# Altium integrated library StudentsLibrary.IntLib: 806 symbols (part 3 of 10)
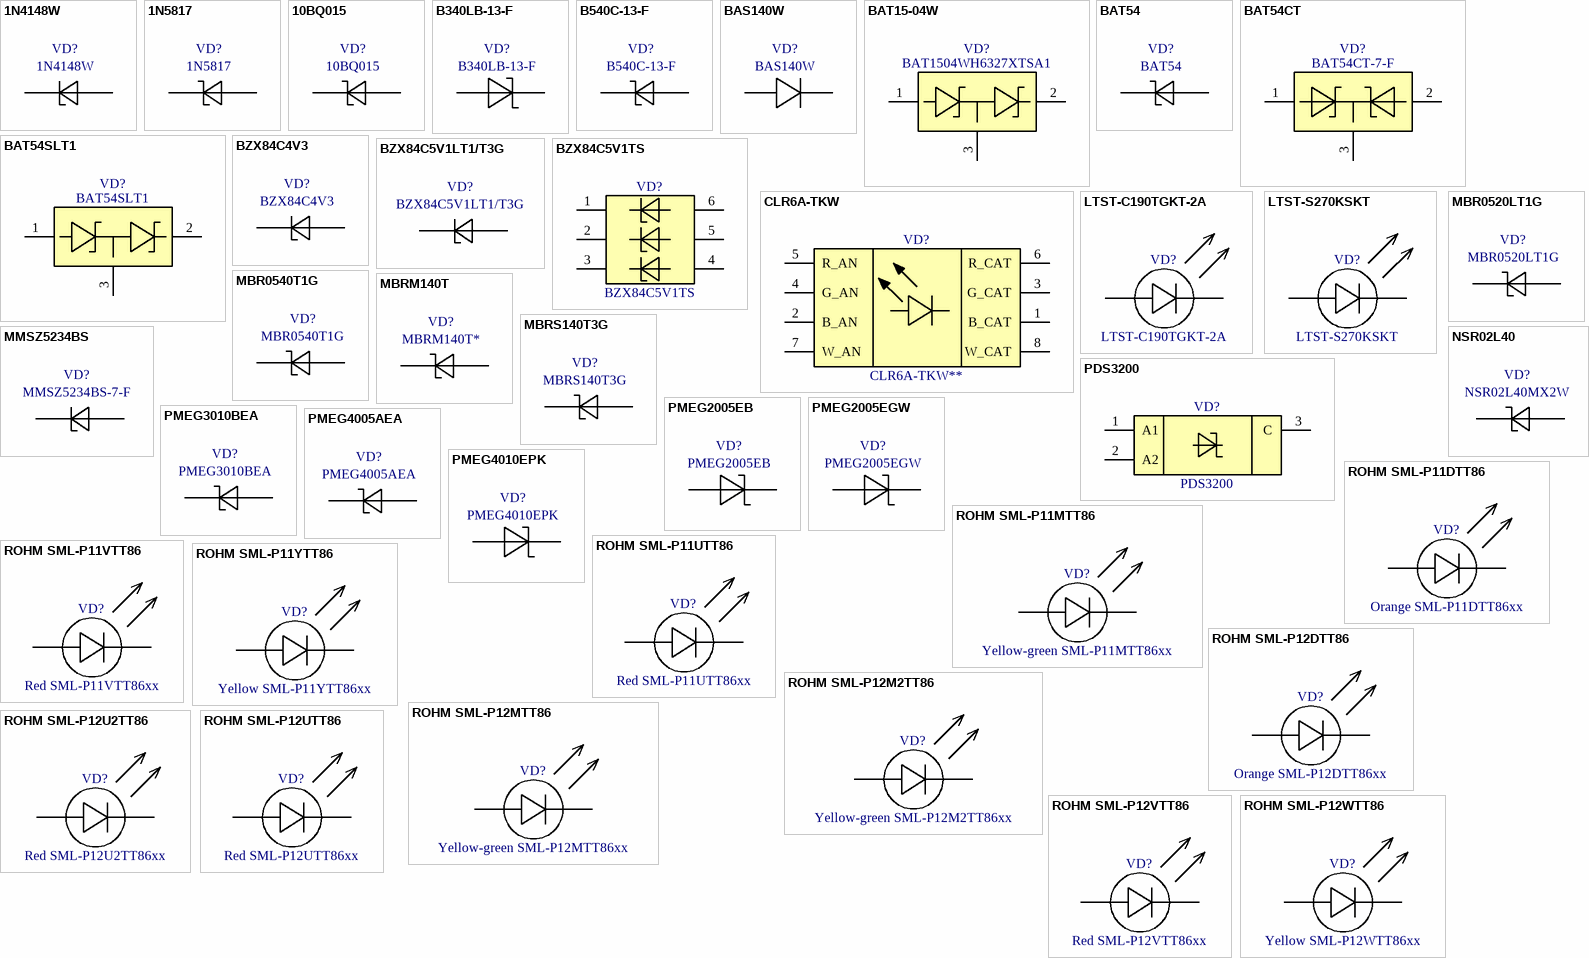
[diagram p49: symbols 1N4148W to ROHM SML-P12WTT86]

## ROHM SML-P12UTT86
designator VD?, comment Red SML-P12UTT86xx
PICOLED™, Ultra-small and Ultra-thin, Red Chip LED; Manufacturer: ROHM; I_Forward: 20 мА; V_Forward: 2 В; PartNumber: SML-P12UTT86xx; Color: Red; ComponentLink1Description: Product Page; ComponentLink1URL: https://www.rohm.com/products/led/chip-leds-mono-color-type/standard/sml-p12ut_r_-product; Package: 0402; ComponentLink2Description: DataSheet; ComponentLink2URL: https://fscdn.rohm.com/en/products/databook/datasheet/opto/led/chip_mono/sml-p12utt86(r)-e.pdf
footprint ROHM SML-P12UTT86 (ROHM LED 0402 Top View Red (Code U) 1.0x0.6x0.25)
pins: A, C
1 alternate drawing of the same symbol

## ROHM SML-P12VTT86
designator VD?, comment Red SML-P12VTT86xx
PICOLED™, Ultra-small and Ultra-thin, Red Chip LED; Manufacturer: ROHM; I_Forward: 20 мА; V_Forward: 2 В; PartNumber: SML-P12VTT86xx; Color: Red; ComponentLink1Description: Product Page; ComponentLink1URL: https://www.rohm.com/products/led/chip-leds-mono-color-type/standard/sml-p12vt_r_-product; Package: 0402; ComponentLink2Description: DataSheet; ComponentLink2URL: https://fscdn.rohm.com/en/products/databook/datasheet/opto/led/chip_mono/sml-p12vtt86(r)-e.pdf
footprint ROHM SML-P12VTT86 (ROHM LED 0402 Top View Red (Code V) 1.0x0.6x0.25)
pins: A, C
1 alternate drawing of the same symbol

## ROHM SML-P12WTT86
designator VD?, comment Yellow SML-P12WTT86xx
PICOLED™, Ultra-small and Ultra-thin, Yellow Chip LED; Manufacturer: ROHM; I_Forward: 20 мА; V_Forward: 2,1 В; PartNumber: SML-P12WTT86xx; Color: Yellow; ComponentLink1Description: Product Page; ComponentLink1URL: https://www.rohm.com/products/led/chip-leds-mono-color-type/standard/sml-p12wt_r_-product; Package: 0402; ComponentLink2Description: DataSheet; ComponentLink2URL: https://fscdn.rohm.com/en/products/databook/datasheet/opto/led/chip_mono/sml-p12wtt86(r)-e.pdf
footprint ROHM SML-P12WTT86 (ROHM LED 0402 Top View Yellow (Code W) 1.0x0.6x0.25)
pins: A, C
1 alternate drawing of the same symbol

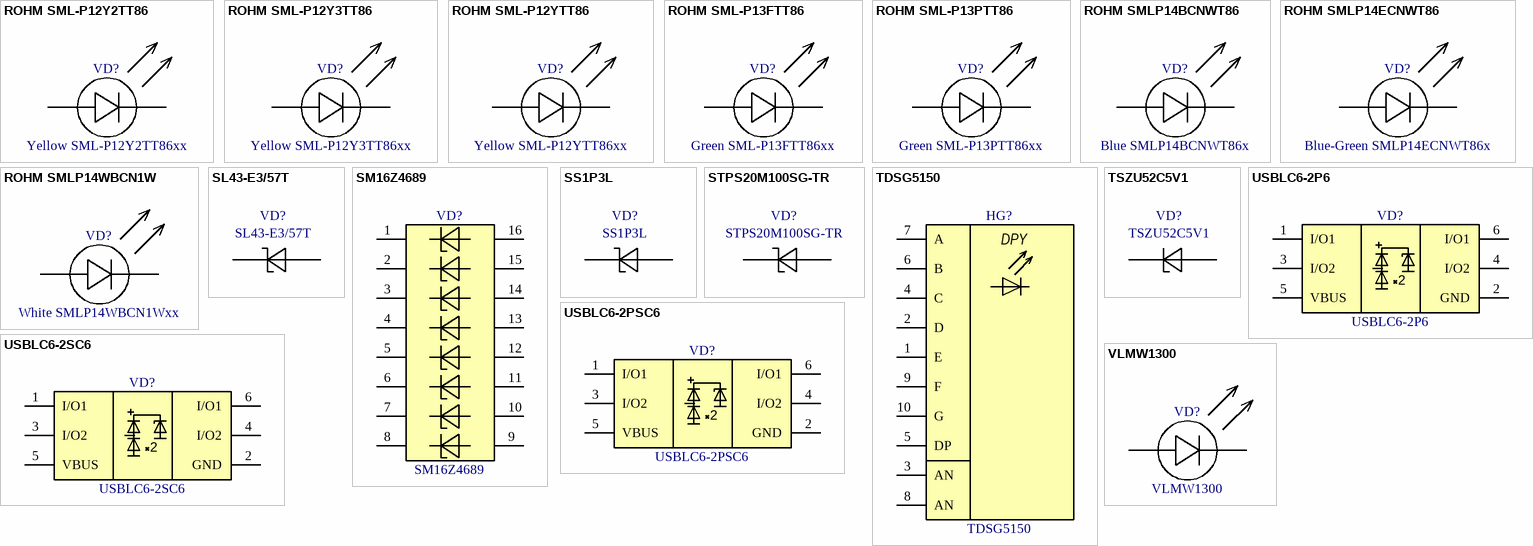
[diagram p6: symbols ROHM SML-P12Y2TT86 to VLMW1300]

## ROHM SML-P12Y2TT86
designator VD?, comment Yellow SML-P12Y2TT86xx
PICOLED™, Ultra-small and Ultra-thin, Yellow Chip LED; Manufacturer: ROHM; I_Forward: 20 мА; V_Forward: 2,1 В; PartNumber: SML-P12Y2TT86xx; Color: Yellow; ComponentLink1Description: Product Page; ComponentLink1URL: https://www.rohm.com/products/led/chip-leds-mono-color-type/standard/sml-p12y2t_r_-product; Package: 0402; ComponentLink2Description: DataSheet; ComponentLink2URL: https://fscdn.rohm.com/en/products/databook/datasheet/opto/led/chip_mono/sml-p12y2tt86(r)-e.pdf
footprint ROHM SML-P12Y2TT86 (ROHM LED 0402 Top View Yellow (Code Y2) 1.0x0.6x0.25)
pins: A, C
1 alternate drawing of the same symbol

## ROHM SML-P12Y3TT86
designator VD?, comment Yellow SML-P12Y3TT86xx
PICOLED™, Ultra-small and Ultra-thin, Yellow Chip LED; Manufacturer: ROHM; I_Forward: 20 мА; V_Forward: 2,1 В; PartNumber: SML-P12Y3TT86xx; Color: Yellow; ComponentLink1Description: Product Page; ComponentLink1URL: https://www.rohm.com/products/led/chip-leds-mono-color-type/standard/sml-p12y3t_r_-product; Package: 0402; ComponentLink2Description: DataSheet; ComponentLink2URL: https://fscdn.rohm.com/en/products/databook/datasheet/opto/led/chip_mono/sml-p12y3tt86(r)-e.pdf
footprint ROHM SML-P12Y3TT86 (ROHM LED 0402 Top View Yellow (Code Y3) 1.0x0.6x0.25)
pins: A, C
1 alternate drawing of the same symbol

## ROHM SML-P12YTT86
designator VD?, comment Yellow SML-P12YTT86xx
PICOLED™, Ultra-small and Ultra-thin, Yellow Chip LED; Manufacturer: ROHM; I_Forward: 20 мА; V_Forward: 2,1 В; PartNumber: SML-P12YTT86xx; Color: Yellow; ComponentLink1Description: Product Page; ComponentLink1URL: https://www.rohm.com/products/led/chip-leds-mono-color-type/standard/sml-p12yt_r_-product; Package: 0402; ComponentLink2Description: DataSheet; ComponentLink2URL: https://fscdn.rohm.com/en/products/databook/datasheet/opto/led/chip_mono/sml-p12ytt86(r)-e.pdf
footprint ROHM SML-P12YTT86 (ROHM LED 0402 Top View Yellow (Code Y) 1.0x0.6x0.25)
pins: A, C
1 alternate drawing of the same symbol

## ROHM SML-P13FTT86
designator VD?, comment Green SML-P13FTT86xx
PICOLED™, Ultra-small and Ultra-thin, Green Chip LED; Manufacturer: ROHM; I_Forward: 20 мА; V_Forward: 2,1 В; PartNumber: SML-P13FTT86xx; Color: Green; ComponentLink1Description: Product Page; ComponentLink1URL: https://www.rohm.com/products/led/chip-leds-mono-color-type/standard/sml-p13ft_r_-product; Package: 0402; ComponentLink2Description: DataSheet; ComponentLink2URL: https://fscdn.rohm.com/en/products/databook/datasheet/opto/led/chip_mono/sml-p13ftt86(r)-e.pdf
footprint ROHM SML-P13FTT86 (ROHM LED 0402 Top View Green (Code F) 1.0x0.6x0.25)
pins: A, C
1 alternate drawing of the same symbol

## ROHM SML-P13PTT86
designator VD?, comment Green SML-P13PTT86xx
PICOLED™, Ultra-small and Ultra-thin, Green Chip LED; Manufacturer: ROHM; I_Forward: 20 мА; V_Forward: 2,1 В; PartNumber: SML-P13PTT86xx; Color: Green; ComponentLink1Description: Product Page; ComponentLink1URL: https://www.rohm.com/products/led/chip-leds-mono-color-type/standard/sml-p13pt_r_-product; Package: 0402; ComponentLink2Description: DataSheet; ComponentLink2URL: https://fscdn.rohm.com/en/products/databook/datasheet/opto/led/chip_mono/sml-p13ptt86(r)-e.pdf
footprint ROHM SML-P13PTT86 (ROHM LED 0402 Top View Green (Code P) 1.0x0.6x0.25)
pins: A, C
1 alternate drawing of the same symbol

## ROHM SMLP14BCNWT86
designator VD?, comment Blue SMLP14BCNWT86x
PICOLED™, Ultra-small and Ultra-thin, High Brightness Blue Chip LED; Manufacturer: ROHM; I_Forward: 5 мА; V_Forward: 2,9 В; PartNumber: SMLP14BCNWT86x; Color: Blue; ComponentLink1Description: Product Page; ComponentLink1URL: https://www.rohm.com/products/led/chip-leds-mono-color-type/standard/smlp14bcnw-product; Package: 0402; ComponentLink2Description: DataSheet; ComponentLink2URL: https://fscdn.rohm.com/en/products/databook/datasheet/opto/led/chip_mono/smlp14bcnwt86-e.pdf
footprint ROHM SMLP14BCNWT86 (ROHM LED 0402 Top View Blue (Code B) 1.0x0.6x0.25)
pins: A, C
1 alternate drawing of the same symbol

## ROHM SMLP14ECNWT86
designator VD?, comment Blue-Green SMLP14ECNWT86x
PICOLED™, Ultra-small and Ultra-thin, High Brightness Green Chip LED; Manufacturer: ROHM; I_Forward: 10 мА; V_Forward: 3 В; PartNumber: SMLP14ECNWT86x; Color: Blue-Green; ComponentLink1Description: Product Page; ComponentLink1URL: https://www.rohm.com/products/led/chip-leds-mono-color-type/standard/smlp14ecnw-product; Package: 0402; ComponentLink2Description: DataSheet; ComponentLink2URL: https://fscdn.rohm.com/en/products/databook/datasheet/opto/led/chip_mono/smlp14ecnwt86-e.pdf
footprint ROHM SMLP14ECNWT86 (ROHM LED 0402 Top View Blue Green (Code EC) 1.0x0.6x0.25)
pins: A, C
1 alternate drawing of the same symbol

## ROHM SMLP14WBCN1W
designator VD?, comment White SMLP14WBCN1Wxx
PICOLED™, Ultra-small and Ultra-thin, High Brightness White Chip LED; Manufacturer: ROHM; I_Forward: 5 мА; V_Forward: 2,9 В; PartNumber: SMLP14WBCN1Wxx; Color: White; ComponentLink1Description: Product Page; ComponentLink1URL: https://www.rohm.com/products/led/chip-leds-mono-color-type/standard/smlp14wbcn1w-product; Package: 0402; ComponentLink2Description: DataSheet; ComponentLink2URL: https://fscdn.rohm.com/en/products/databook/datasheet/opto/led/chip_mono/smlp14wbcn1w1-e.pdf
footprint ROHM SMLP14BCNWT86 (ROHM LED 0402 Top View Blue (Code B) 1.0x0.6x0.25)
pins: A, C
1 alternate drawing of the same symbol

## SL43-E3/57T
designator VD?
SCHOTTKY BARRIER RECTIFIER 4 AMPERES, 30 VOLTS; Manufacturer: Vishay; PartNumber: SL43-E3/57T; ComponentLink1Description: Product Page; ComponentLink1URL: https://www.vishay.com/en/product/88742/
footprint DIOM794X590X262L114X300N (Diode, Molded Body; 6.855 mm L X 5.905 mm W X 2.62 mm H body)
pins: A, C

## SM16Z4689
designator VD?
5.1 Volt Zener Diode Array; Manufacturer: Microchip; PartNumber: SM16Z4689
footprint SOIC16P127_959X599X175L84X40N (Small Outline IC (SOIC), 1.27 mm pitch; 16 pin, 9.595 mm L X 3.91 mm W X 1.75 mm H body)
pins: 1, 2, 3, 4, 5, 6, 7, 8, 9, 10, 11, 12, 13, 14, 15, 16

## SS1P3L
designator VD?
Low VF High Current Density Surface-MountSchottky Barrier Rectifiers; Manufacturer: Vishay; PartNumber: SS1P3L; ComponentLink1Description: Product Page; ComponentLink1URL: https://www.vishay.com/en/product/88915/
footprint DO-220AA (Vishay DO-220AA)
pins: A, C

## STPS20M100SG-TR
designator VD?
100 V, 20 A 3-lead single Low Drop Power Schottky Rectifier; Manufacturer: STMicroelectronics; PartNumber: STPS20M100SG-TR; ComponentLink1Description: Product Page; ComponentLink1URL: https://www.st.com/en/diodes-and-rectifiers/stps20m100s.html; ComponentLink2Description: DataSheet; ComponentLink2URL: https://www.st.com/resource/en/datasheet/stps20m100s.pdf
footprint DPAK254P1542X460-3N (D2-PAK, 3-Pads, Body 7,78x8,64mm (max), IPC Medium Density)
pins: 1, 3 A, 4 C

## TDSG5150
designator HG?
Standard 7-Segment Display 13 mm, Green, Common anode; Manufacturer: Vishay; Face: Grey; PartNumber: TDSG5150; Color: Green; ComponentLink1Description: Product Page; ComponentLink1URL: https://www.vishay.com/en/product/83126/; ComponentLink2Description: DataSheet; ComponentLink2URL: https://www.vishay.com/docs/83126/tdsx51x0.pdf
footprint VISHAY TDSG5150 (VISHAY 7-digit display 13mm, Face Grey, Color Green)
pins: 1 E, 2 D, 3 AN, 4 C, 5 DP, 6 B, 7 A, 8 AN, 9 F, 10 G
1 alternate drawing of the same symbol
text: DPY

## TSZU52C5V1
designator VD?
SMD Zener Diode; Manufacturer: Taiwan Semiconductor; PartNumber: TSZU52C5V1; ComponentLink1Description: Product Page; ComponentLink1URL: https://www.taiwansemi.com/en/products/details/TSZU52C5V1; ComponentLink2Description: DataSheet; ComponentLink2URL: https://www.taiwansemi.com/assets/uploads/datasheet/TSZU52C2V0%20SERIES_G2009.pdf
footprint DIOC170X90X85L45N (Diode, Chip; 1.70 mm L X 0.90 mm W X 0.85 mm H body)
pins: A, C

## USBLC6-2P6
designator VD?
Very low capacitance ESD protection USB 2.0, SOT-666; Manufacturer: STMicroelectronics; PartNumber: USBLC6-2P6; ComponentLink1Description: Product Page; ComponentLink1URL: https://www.st.com/en/protections-and-emi-filters/usblc6-2.html; ComponentLink2Description: DataSheet; ComponentLink2URL: https://www.st.com/resource/en/datasheet/usblc6-2.pdf
footprint STM SOT-666 (Diode, Small Outline Flat Lead (SOFL), 0.50 mm pitch; 6 pin, 1.60 mm L X 1.20 mm W X 0.62 mm H body)
pins: 1 I/O1, 2 GND, 3 I/O2, 4 I/O2, 5 VBUS, 6 I/O1

## USBLC6-2PSC6
designator VD?
Very low capacitance ESD protection USB 2.0, SOT-23-6L; Manufacturer: STMicroelectronics; PartNumber: USBLC6-2PSC6; ComponentLink1Description: Product Page; ComponentLink1URL: https://www.st.com/en/protections-and-emi-filters/usblc6-2.html; ComponentLink2Description: DataSheet; ComponentLink2URL: https://www.st.com/resource/en/datasheet/usblc6-2.pdf
footprint SOT23-6P95_280X145L45X40N (Small Outline Transistor (SOT23), 0.95 mm pitch; 6 pin, 2.925 mm L X 1.625 mm W X 1.45 mm H body)
pins: 1 I/O1, 2 GND, 3 I/O2, 4 I/O2, 5 VBUS, 6 I/O1

## USBLC6-2SC6
designator VD?
Very low capacitance ESD protection USB 2.0, SOT-23-6L; Manufacturer: STMicroelectronics; PartNumber: USBLC6-2SC6; ComponentLink1Description: Product Page; ComponentLink1URL: https://www.st.com/en/protections-and-emi-filters/usblc6-2.html; ComponentLink2Description: DataSheet; ComponentLink2URL: https://www.st.com/resource/en/datasheet/usblc6-2.pdf
footprint SOT23-6P95_280X145L45X40N (Small Outline Transistor (SOT23), 0.95 mm pitch; 6 pin, 2.925 mm L X 1.625 mm W X 1.45 mm H body)
pins: 1 I/O1, 2 GND, 3 I/O2, 4 I/O2, 5 VBUS, 6 I/O1

## VLMW1300
designator VD?
Highbright 0603 ChipLED, White; Manufacturer: Vishay; I_Forward: 5 mA; V_Forward: 2.9 V; PartNumber: VLMW1300; Color: White; ComponentLink1Description: Product Page; ComponentLink1URL: https://www.vishay.com/en/product/82435/; ComponentLink2Description: DataSheet; ComponentLink2URL: https://www.vishay.com/docs/82435/vlmw1300.pdf
footprint VISHAY ChipLED SMD0603 (Vishay LED SMD0603 White)
pins: A, C


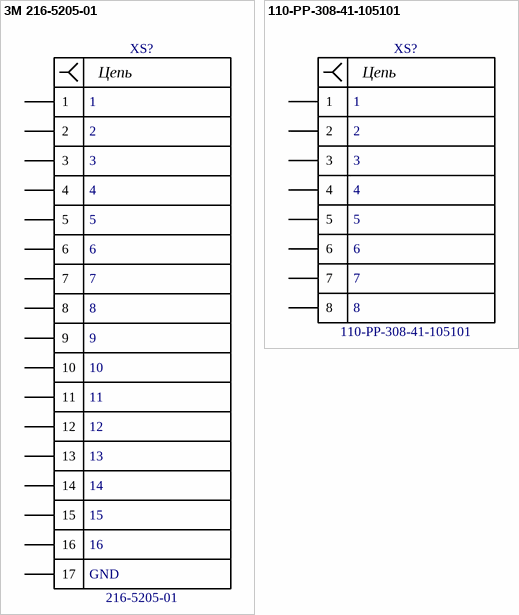
[diagram p7: symbols 3M 216-5205-01 to 110-PP-308-41-105101]

## 3M 216-5205-01
designator XS?, comment 216-5205-01  Net17: GND  Net16: 16  Net15: 15  Net14: 14  Net13: 13  Net12: 12  Net11: 11  Net10: 10  Net9: 9  Net8: 8  Net7: 7  Net6: 6  Net5: 5  Net4: 4  Net3: 3  Net2: 2  Net1: 1
3M™ Textool™ Open-Top Sockets for QFN Applications, 0.5 mm Pitch, 16 Pos, Even Row, 3x3 Pkg; Manufacturer: 3M; PartNumber: 216-5205-01; ComponentLink1Description: Product Page; ComponentLink1URL: https://www.precidip.com/pview/110-PP-308-41-105101.html
footprint 3M 216-5205-01 (3M™ Textool™ Open-Top Sockets for QFN Applications, 0.5 mm Pitch, 16 Pos, Even Row, 3x3 Pkg)
pins: 1, 2, 3, 4, 5, 6, 7, 8, 9, 10, 11, 12, 13, 14, 15, 16, 17
text: Цепь

## 110-PP-308-41-105101
designator XS?  Net8: 8  Net7: 7  Net6: 6  Net5: 5  Net4: 4  Net3: 3  Net2: 2  Net1: 1
DIP SMT SOCKET Pitch 2.54mm 8 Poles Width 7.62mm; Manufacturer: Preci-DIP; PartNumber: 110-PP-308-41-105101; ComponentLink1Description: Product Page; ComponentLink1URL: https://www.precidip.com/pview/110-PP-308-41-105101.html
footprint 110-PP-310-41-105101 (DIP SMT SOCKET Pitch 2.54mm 8 Poles Width 7.62mm)
pins: 1, 2, 3, 4, 5, 6, 7, 8
text: Цепь


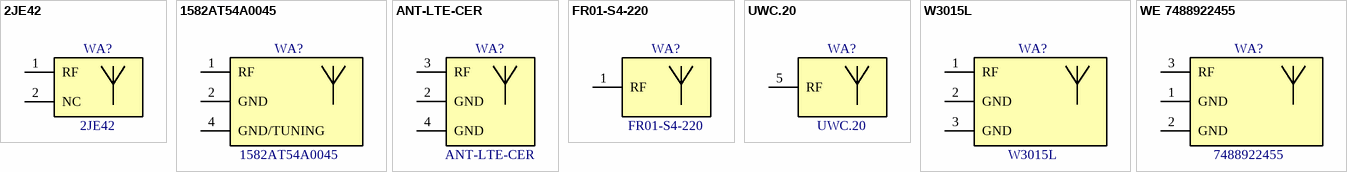
[diagram p8: symbols 2JE42 to WE 7488922455]

## 2JE42
designator WA?
915 MHz ISM Surface Mount; Manufacturer: 2J Antennas; PartNumber: 2JE42; ComponentLink1Description: Product Page; ComponentLink1URL: https://www.2j-antennas.com/antennas/single-internal-antennas/2je42-915-mhz-ism-surface-mount-compact-fiberglass-antenna/676; ComponentLink2Description: DataSheet; ComponentLink2URL: https://www.2j-antennas.com/media/original/datasheets/2je42.pdf
footprint 2JE42 (915 MHz ISM Surface Mount)
pins: 1 RF, 2 NC

## 1582AT54A0045
designator WA?
1.585GHz Global Navigation (GPS, GLONASS, Beidou, Galileo) SMD Chip Antenna; Manufacturer: Johanson Technology; PartNumber: 1582AT54A0045; ComponentLink1Description: Product Page; ComponentLink1URL: https://www.johansontechnology.com/antennas?option=com_products&id=1582AT54A0045; ComponentLink2Description: DataSheet; ComponentLink2URL: https://www.johansontechnology.com/datasheets/1582AT54A0045/1582AT54A0045.pdf
footprint 1582AT54A0045 (Johanson Technology chip antenna 1582AT54A0045)
pins: 1 RF, 2 GND, 4 GND/TUNING

## ANT-LTE-CER
designator WA?
Ceramic  4G/3G/2G LTE Antenna; Manufacturer: Linx Technologies; PartNumber: ANT-LTE-CER; ComponentLink1Description: Product Page; ComponentLink1URL: https://linxtechnologies.com/wp/product/lte-chip-antenna/
footprint ANT-LTE-CER (Linx ANT-LTE-CER)
pins: 1 NC hidden, 2 GND, 3 RF, 4 GND, 5 NC hidden

## FR01-S4-220
designator WA?
The ALL mXTENDTM chip antenna standards GSM850, GSM900,  GSM1800/DCS, GSM1900/PCS, UMTS, LTE700, LTE800, LTE850, LTE900, LTE1700,  LTE1800, LTE1900, LTE2000, LTE2100, LTE2300, LTE2500, and LTE2600; Manufacturer: Ignion; PartNumber: FR01-S4-220
footprint FR01-S4-220 (ALL mXTEND FR01-S4-220)
pins: 1 RF, 2 NC hidden, 3 NC hidden, 4 NC hidden

## UWC.20
designator WA?
3-5GHz & 6-9GHz Ultra-Wide Band (UWB) SMD Chip Antenna; Manufacturer: Taoglas; PartNumber: UWC.20; ComponentLink1Description: Product Page; ComponentLink1URL: https://www.taoglas.com/product/uwc-20-3-5ghz-6-9ghz-ultra-wideband-uwb-smd-chip-antenna/
footprint UWC.20 (Taoglas Chip-antenna 12mm x 12mm x 3.3mm, GND plane offset 2.4 mm)
pins: 1 NC hidden, 2 NC hidden, 3 NC hidden, 4 NC hidden, 5 RF, 6 NC hidden

## W3015L
designator WA?
ISM433MHz Embedded Antenna; Manufacturer: Pulse; PartNumber: W3015L; ComponentLink1Description: Product Page; ComponentLink1URL: https://productfinder.pulseelectronics.com/product/w3015l
footprint W3015L (Pulse Chip Antenna 3.15 mm X 10 mm X 4 mm)
pins: 1 RF, 2 GND, 3 GND

## WE 7488922455
designator WA?, comment 7488922455
WE-MCA Multilayer Chip Antenna 2400-2500 MHz, 5000-6000 MHz; Manufacturer: Wurth Elekntronik; PartNumber: 7488922455; ComponentLink1Description: Product Page; ComponentLink1URL: https://www.we-online.com/en/components/products/WE-MCA_WCO
footprint WE 7488922455 (WE-MCA Multilayer Chip Antenna)
pins: 1 GND, 2 GND, 3 RF


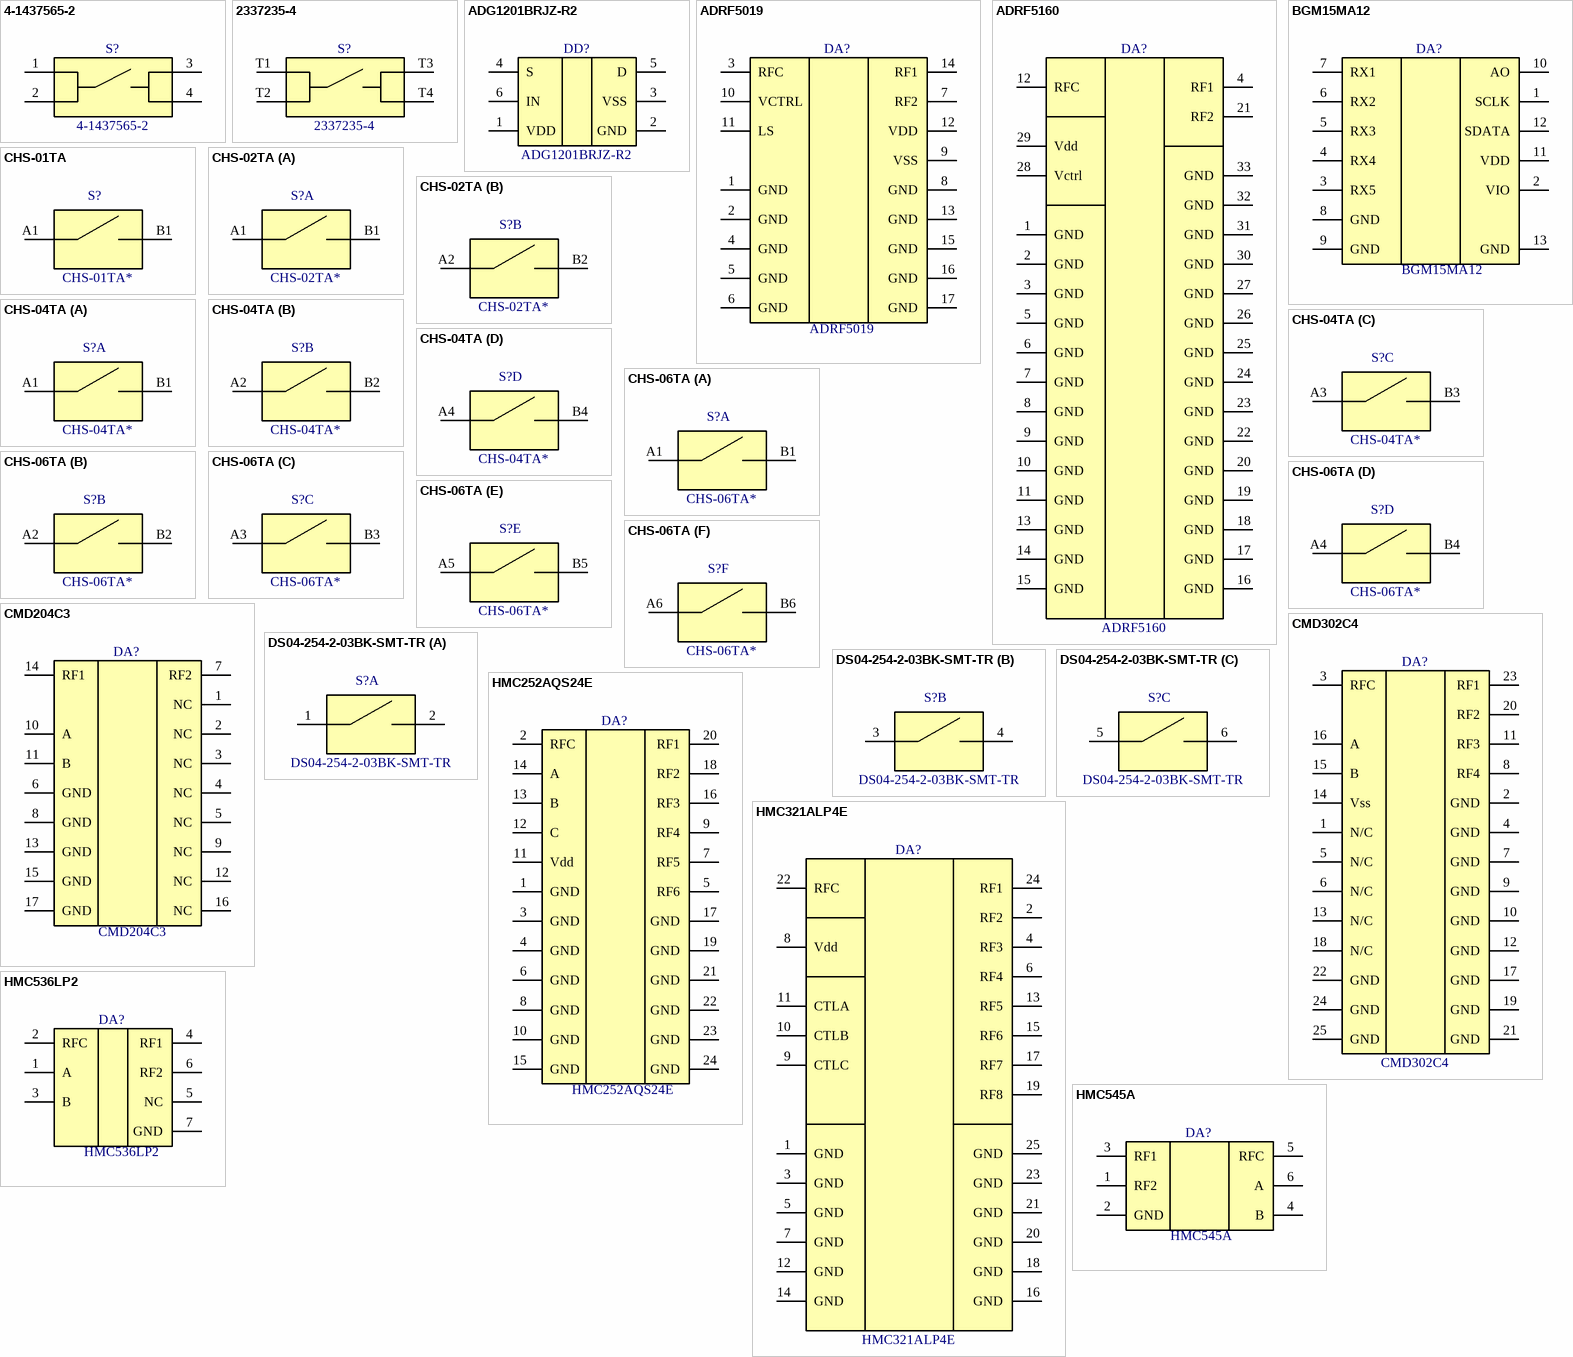
[diagram p9: symbols 4-1437565-2 to HMC545A]

## 4-1437565-2
designator S?
Tactile Switches, Round Actuator Style, NO, Copper Alloy, Silver, Low Profile, 50 mA, 24 VDC; Manufacturer: TE Connectivity; PartNumber: 4-1437565-2; ComponentLink1Description: Product Page; ComponentLink1URL: https://www.te.com/usa-en/product-4-1437565-2.html; FunctionName: *; ComponentLink2Description: DataSheet; ComponentLink2URL: https://www.te.com/usa-en/product-4-1437565-2.datasheet.pdf
footprint 4-1437565-2 (Low Profile 6X6X5 mm BLACK)
footprint 4-1437565-2-FunctionName (Low Profile 6X6X5 mm BLACK)
pins: 1, 2, 3, 4

## 2337235-4
designator S?
Tactile Switches, Round Actuator Style, NO, Stainless Steel, Silver, Low Profile, 50 mA, 12 VDC, Alcoswitch LPT; Manufacturer: TE Connectivity; PartNumber: 2337235-4; ComponentLink1Description: Product Page; ComponentLink1URL: https://www.te.com/usa-en/product-2337235-4.html; FunctionName: *; ComponentLink2Description: DataSheet; ComponentLink2URL: https://www.te.com/usa-en/product-2337235-4.datasheet.pdf
footprint 2337235-4 (TE 4.6X4.4X1.05)
footprint 2337235-4-FunctionName (TE 4.6X4.4X1.05)
pins: T1, T2, T3, T4

## ADG1201BRJZ-R2
designator DD?
Low Capacitance, Low Charge Injection, ±15 V/+12 V, iCMOS, SPST in SOT-23; Manufacturer: Analog Devices; PartNumber: ADG1201BRJZ-R2; ComponentLink1Description: Product Page; ComponentLink1URL: https://www.analog.com/en/products/adg1201.html; ComponentLink2Description: DataSheet; ComponentLink2URL: https://www.analog.com/media/en/technical-documentation/data-sheets/ADG1201.pdf
footprint SOT23-6P95_280X145L45X40N (Small Outline Transistor (SOT23), 0.95 mm pitch; 6 pin, 2.925 mm L X 1.625 mm W X 1.45 mm H body)
pins: 1 VDD, 2 GND, 3 VSS, 4 S, 5 D, 6 IN

## ADRF5019
designator DA?
Silicon, SPDT Switch, Nonreflective,  100 MHz to 13 GHz; Manufacturer: Analog Devices; PartNumber: ADRF5019; ComponentLink1Description: Product Page; ComponentLink1URL: https://www.analog.com/en/products/adrf5019.html; ComponentLink2Description: DataSheet; ComponentLink2URL: https://www.analog.com/media/en/technical-documentation/data-sheets/ADRF5019.pdf
footprint QFN17P50_300X300X95L30X25T170N (Quad Flat No-Lead (QFN with Tab), 0.50 mm pitch; square, 4 pin X 4 pin, 3.00 mm L X 3.00 mm W X 0.95 mm H body)
pins: 1 GND, 2 GND, 3 RFC, 4 GND, 5 GND, 6 GND, 7 RF2, 8 GND, 9 VSS, 10 VCTRL, 11 LS, 12 VDD, 13 GND, 14 RF1, 15 GND, 16 GND, 17 GND

## ADRF5160
designator DA?
Silicon SPDT, / Reflective Switch, 0.7 GHz to 4.0 GHz; Manufacturer: Analog Devices; PartNumber: ADRF5160; ComponentLink1Description: Product Page; ComponentLink1URL: https://www.analog.com/en/products/adrf5160.html; ComponentLink2Description: DataSheet; ComponentLink2URL: https://www.analog.com/media/en/technical-documentation/data-sheets/adrf5160.pdf
footprint QFN33P50_500X500X90L40X25T370N (Quad Flat No-Lead (QFN with Tab), 0.50 mm pitch; square, 8 pin X 8 pin, 5.00 mm L X 5.00 mm W X 0.90 mm H body)
pins: 1 GND, 2 GND, 3 GND, 4 RF1, 5 GND, 6 GND, 7 GND, 8 GND, 9 GND, 10 GND, 11 GND, 12 RFC, 13 GND, 14 GND, 15 GND, 16 GND, 17 GND, 18 GND, 19 GND, 20 GND, 21 RF2, 22 GND, 23 GND, 24 GND, 25 GND, 26 GND, 27 GND, 28 Vctrl, 29 Vdd, 30 GND, 31 GND, 32 GND, 33 GND

## BGM15MA12
designator DA?
Mid-Band LNA Multiplexer Module; Manufacturer: Infineon; PartNumber: BGM15MA12; ComponentLink1Description: Product Page; ComponentLink1URL: https://www.infineon.com/cms/en/product/rf-wireless-control/rf-modules-lmm/bgm15la12/; ComponentLink2Description: DataSheet; ComponentLink2URL: https://www.infineon.com/dgdl/Infineon-BGM15LA12-DS-v03_00-EN.pdf?fileId=5546d462503812bb0150844d0dab46c7
footprint ATSLP-12-2 (Infineon case ATSLP-12-2)
pins: 1 SCLK, 2 VIO, 3 RX5, 4 RX4, 5 RX3, 6 RX2, 7 RX1, 8 GND, 9 GND, 10 AO, 11 VDD, 12 SDATA, 13 GND

## CHS-01TA
designator S?, comment CHS-01TA*
Low profile DIP-switch 1bit washable; Manufacturer: Nidec Copal Electronics; PartNumber: CHS-01TA*; ComponentLink1Description: Product Page; ComponentLink1URL: https://www.nidec-copal-electronics.com/e/product/detail/00000603/#; ComponentLink2Description: DataSheet; ComponentLink2URL: https://www.nidec-copal-electronics.com/e/catalog/switch/chs.pdf
footprint CHS-01TA (Nicel Copal Electronics Low Profile)
pins: A1, B1

## CHS-02TA
designator S?, comment CHS-02TA*
Low profile DIP-switch 2bit washable; Manufacturer: Nidec Copal Electronics; PartNumber: CHS-02TA*; ComponentLink1Description: Product Page; ComponentLink1URL: https://www.nidec-copal-electronics.com/e/product/detail/00000603/#; ComponentLink2Description: DataSheet; ComponentLink2URL: https://www.nidec-copal-electronics.com/e/catalog/switch/chs.pdf
footprint CHS-02TA (Nicel Copal Electronics Low Profile)
part A pins: A1, B1
part B pins: A2, B2

## CHS-04TA
designator S?, comment CHS-04TA*
Low profile DIP-switch 4bit washable; Manufacturer: Nidec Copal Electronics; PartNumber: CHS-04TA*; ComponentLink1Description: Product Page; ComponentLink1URL: https://www.nidec-copal-electronics.com/e/product/detail/00000603/#; ComponentLink2Description: DataSheet; ComponentLink2URL: https://www.nidec-copal-electronics.com/e/catalog/switch/chs.pdf
footprint CHS-04TA (Nicel Copal Electronics Low Profile)
part A pins: A1, B1
part B pins: A2, B2
part C pins: A3, B3
part D pins: A4, B4

## CHS-06TA
designator S?, comment CHS-06TA*
Low profile DIP-switch 6bit washable; Manufacturer: Nidec Copal Electronics; PartNumber: CHS-06TA*; ComponentLink1Description: Product Page; ComponentLink1URL: https://www.nidec-copal-electronics.com/e/product/detail/00000603/#; ComponentLink2Description: DataSheet; ComponentLink2URL: https://www.nidec-copal-electronics.com/e/catalog/switch/chs.pdf
footprint CHS-06TA (Nicel Copal Electronics Low Profile)
part A pins: A1, B1
part B pins: A2, B2
part C pins: A3, B3
part D pins: A4, B4
part E pins: A5, B5
part F pins: A6, B6

## CMD204C3
designator DA?
DC-20 GHz SPST Non-reflective Switch; Manufacturer: Qorvo; PartNumber: CMD204C3; ComponentLink1Description: Product Page; ComponentLink1URL: https://www.qorvo.com/products/p/CMD204C3; ComponentLink2Description: DataSheet; ComponentLink2URL: https://www.qorvo.com/products/d/da007468
footprint PQFN17P50_290X290X90L32X30T150N (Pullback Quad Flat No-Lead (PQFN with Tab), 0.50 mm pitch; square, 4 pin X 4 pin, 2.90 mm L X 2.90 mm W X 0.90 mm H body)
pins: 1 NC, 2 NC, 3 NC, 4 NC, 5 NC, 6 GND, 7 RF2, 8 GND, 9 NC, 10 A, 11 B, 12 NC, 13 GND, 14 RF1, 15 GND, 16 NC, 17 GND

## CMD302C4
designator DA?
DC-20 GHz SP4T Non-reflective Switch; Manufacturer: Qorvo; PartNumber: CMD302C4; ComponentLink1Description: Product Page; ComponentLink1URL: https://www.qorvo.com/products/p/CMD302C4; ComponentLink2Description: DataSheet; ComponentLink2URL: https://www.qorvo.com/products/d/da007697
footprint PQFN25P50_390X390X100L32X30T250N (Pullback Quad Flat No-Lead (PQFN with Tab), 0.50 mm pitch; square, 6 pin X 6 pin, 3.90 mm L X 3.90 mm W X 1.00 mm H body)
pins: 1 N/C, 2 GND, 3 RFC, 4 GND, 5 N/C, 6 N/C, 7 GND, 8 RF4, 9 GND, 10 GND, 11 RF3, 12 GND, 13 N/C, 14 Vss, 15 B, 16 A, 17 GND, 18 N/C, 19 GND, 20 RF2, 21 GND, 22 GND, 23 RF1, 24 GND, 25 GND

## DS04-254-2-03BK-SMT-TR
designator S?
Same Sky DIP-Switch, DS04-254-SMT Series, 3 pos; PartNumber: DS04-254-2-03BK-SMT-TR; Manufacturer: Same Sky; ComponentLink1Description: Product Page; ComponentLink1URL: https://www.sameskydevices.com/product/switches/dip-switches/ds04-254-2-03bk-smt-tr; ComponentLink2Description: DataSheet; ComponentLink2URL: https://www.sameskydevices.com/product/resource/ds04-254-smt.pdf
footprint DS04-254-2-03BK-SMT-TR (Same Sky DIP-Switch, DS04-254-SMT Series, 3 pos)
part A pins: 1, 2
part B pins: 3, 4
part C pins: 5, 6

## HMC252AQS24E
designator DA?
GaAs MMIC SP6T NON-REFLECTIVESWITCH, DC - 3 GHz; Manufacturer: Analog Devices; PartNumber: HMC252AQS24E; ComponentLink1Description: Product Page; ComponentLink1URL: https://www.analog.com/en/products/hmc252a.html; ComponentLink2Description: DataSheet; ComponentLink2URL: https://www.analog.com/media/en/technical-documentation/data-sheets/hmc252A.pdf
footprint SOP64P600X175-24N (SOP, 24-Leads, Body 8.65x3.90mm, Pitch 0.64mm, IPC Medium Density)
pins: 1 GND, 2 RFC, 3 GND, 4 GND, 5 RF6, 6 GND, 7 RF5, 8 GND, 9 RF4, 10 GND, 11 Vdd, 12 C, 13 B, 14 A, 15 GND, 16 RF3, 17 GND, 18 RF2, 19 GND, 20 RF1, 21 GND, 22 GND, 23 GND, 24 GND

## HMC321ALP4E
designator DA?
SP8T NON-REFLECTIVE / POSITIVE CONTROL SWITCH, DC - 8 GHz; Manufacturer: Analog Devices; ComponentLink1Description: Product Page; ComponentLink1URL: https://www.analog.com/en/products/hmc321a.html; PartNumber: HMC321ALP4E; ComponentLink2Description: DataSheet; ComponentLink2URL: https://www.analog.com/media/en/technical-documentation/data-sheets/HMC1118.pdf
footprint QFN25P50_400X400X95L40X25T270N (Quad Flat No-Lead (QFN with Tab), 0.50 mm pitch; square, 6 pin X 6 pin, 4.00 mm L X 4.00 mm W X 0.95 mm H body)
pins: 1 GND, 2 RF2, 3 GND, 4 RF3, 5 GND, 6 RF4, 7 GND, 8 Vdd, 9 CTLC, 10 CTLB, 11 CTLA, 12 GND, 13 RF5, 14 GND, 15 RF6, 16 GND, 17 RF7, 18 GND, 19 RF8, 20 GND, 21 GND, 22 RFC, 23 GND, 24 RF1, 25 GND

## HMC536LP2
designator DA?
GaAs MMIC POSITIVE CONTROL T/R SWITCH, DC - 6 GHz; Manufacturer: Analog Devices; PartNumber: HMC536LP2; ComponentLink1Description: Product Page; ComponentLink1URL: https://www.analog.com/en/products/hmc536lp2.html; ComponentLink2Description: DataSheet; ComponentLink2URL: https://www.analog.com/media/en/technical-documentation/data-sheets/hmc536chips.pdf
footprint SON7P65_200X200X100L35X25T140X80N (Small Outline No-Lead (SON with Tab), 0.65 mm pitch; 6 pin, 2.00 mm L X 2.00 mm W X 1.00 mm H body)
pins: 1 A, 2 RFC, 3 B, 4 RF1, 5 NC, 6 RF2, 7 GND

## HMC545A
designator DA?
GaAs MMIC SPDT SWITCH, DC - 3 GHz; Manufacturer: Analog Devices; PartNumber: HMC545A; ComponentLink1Description: Product Page; ComponentLink1URL: https://www.analog.com/en/products/hmc545a.html; ComponentLink2Description: DataSheet; ComponentLink2URL: https://www.analog.com/media/en/technical-documentation/data-sheets/HMC545A_545AE.pdf
footprint SOP6P95_290X280X145L45X40N (Small Outline Pkg (SOP), 0.95 mm pitch; 6 pin, 2.90 mm L X 1.60 mm W X 1.45 mm H body)
pins: 1 RF2, 2 GND, 3 RF1, 4 B, 5 RFC, 6 A

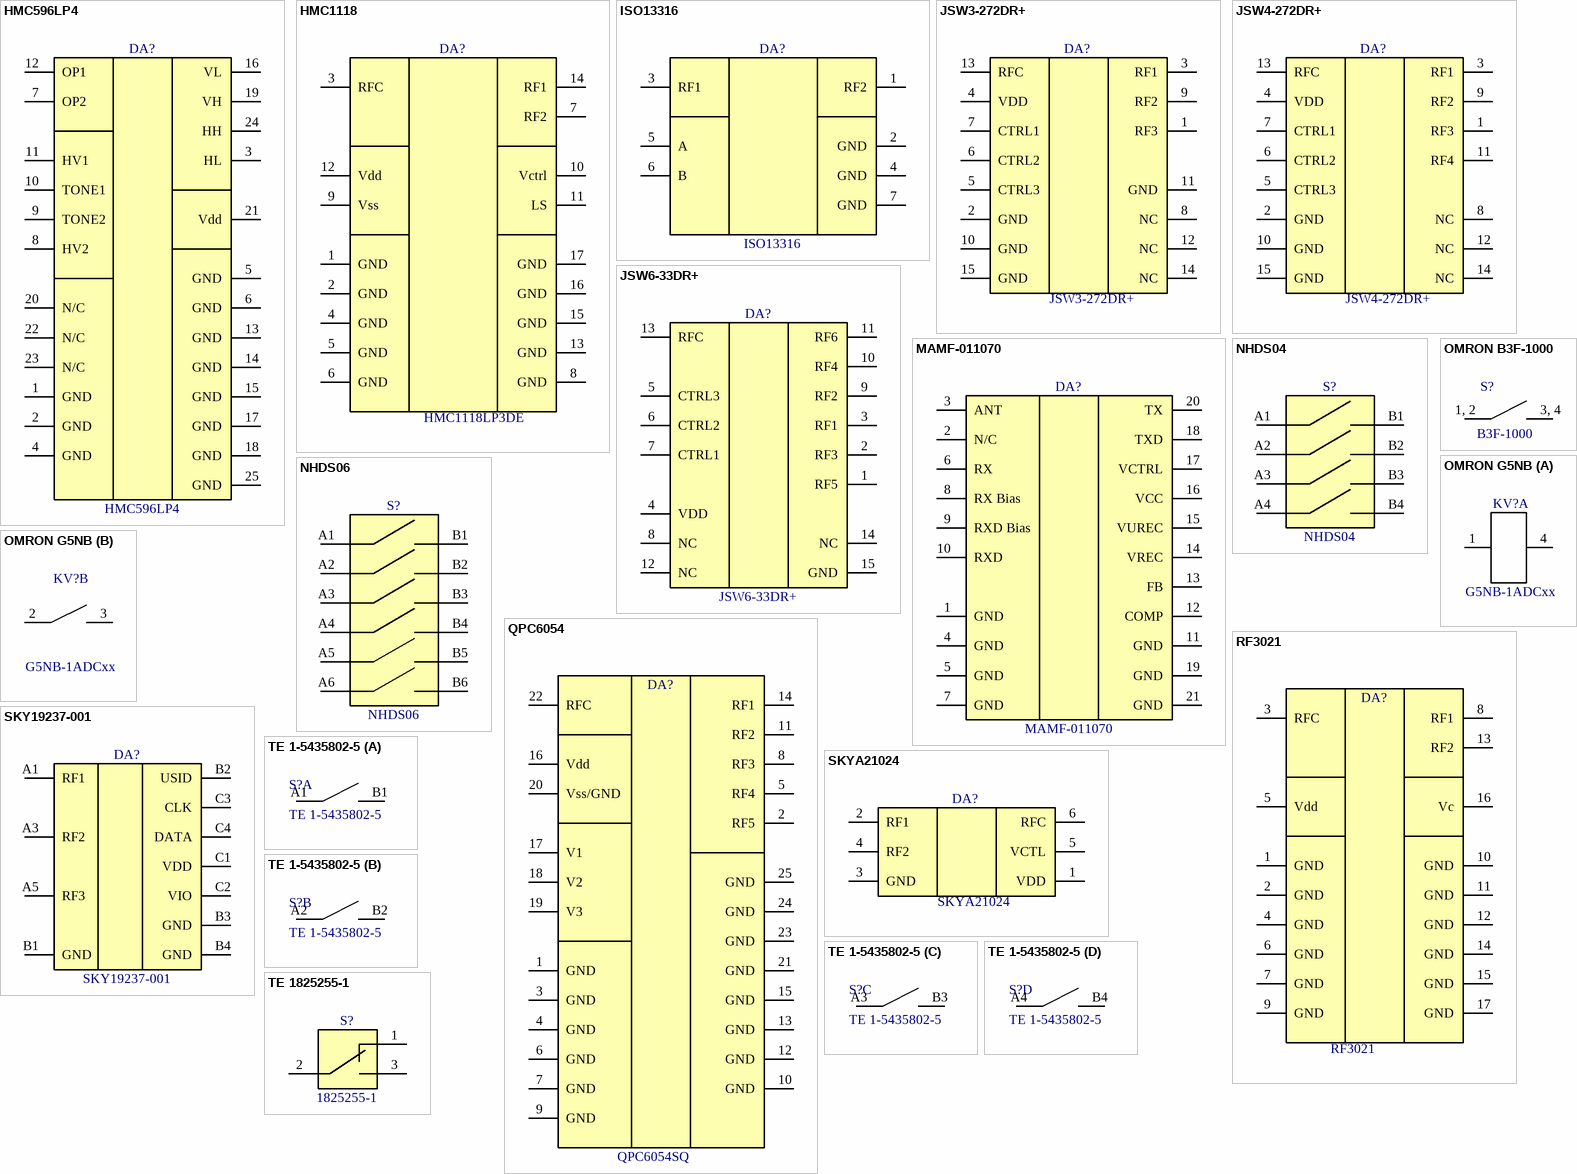
[diagram p10: symbols HMC596LP4 to TE 1825255-1]

## HMC596LP4
designator DA?
SMT CMOS 4x2 SWITCH MATRIX, 0.2 - 3.0 GHz; Manufacturer: Analog Devices; PartNumber: HMC596LP4; ComponentLink1Description: Product Page; ComponentLink1URL: https://www.analog.com/en/products/hmc596.html; ComponentLink2Description: DataSheet; ComponentLink2URL: https://www.analog.com/media/en/technical-documentation/data-sheets/hmc596.pdf
footprint QFN25P50_400X400X100L40X24T280N (Quad Flat No-Lead (QFN with Tab), 0.50 mm pitch; square, 6 pin X 6 pin, 4.00 mm L X 4.00 mm W X 1.00 mm H body)
pins: 1 GND, 2 GND, 3 HL, 4 GND, 5 GND, 6 GND, 7 OP2, 8 HV2, 9 TONE2, 10 TONE1, 11 HV1, 12 OP1, 13 GND, 14 GND, 15 GND, 16 VL, 17 GND, 18 GND, 19 VH, 20 N/C, 21 Vdd, 22 N/C, 23 N/C, 24 HH, 25 GND

## HMC1118
designator DA?, comment HMC1118LP3DE
High Isolation Nonreflective Switch, 9 kHz to 13.0 GHz; Manufacturer: Analog Devices; ComponentLink1Description: Product Page; ComponentLink1URL: https://www.analog.com/en/products/HMC1118.html; PartNumber: HMC1118LP3DE; ComponentLink2Description: DataSheet; ComponentLink2URL: https://www.analog.com/media/en/technical-documentation/data-sheets/HMC1118.pdf
footprint PQFN50P300X300X85_HS-17M (PQFN, 16-Leads, Body 3,00x3,00mm, Pitch 0,50mm, Thermal Pad 1,50x1,50mm, IPC Low Density)
pins: 1 GND, 2 GND, 3 RFC, 4 GND, 5 GND, 6 GND, 7 RF2, 8 GND, 9 Vss, 10 Vctrl, 11 LS, 12 Vdd, 13 GND, 14 RF1, 15 GND, 16 GND, 17 GND

## ISO13316
designator DA?
Non-Reflective Switch, DC to 6 GHz; Manufacturer: Skyworks; PartNumber: ISO13316; ComponentLink1Description: Product Page; ComponentLink1URL: https://www.skyworksinc.com/en/Products/switches/ISO13316; ComponentLink2Description: DataSheet; ComponentLink2URL: https://www.skyworksinc.com/-/media/SkyWorks/Documents/Products/2601-2700/ISO13316_203249B.pdf
footprint ISO-13316
pins: 1 RF2, 2 GND, 3 RF1, 4 GND, 5 A, 6 B, 7 GND

## JSW3-272DR+
designator DA?
Reflective SP3T, SMT Solid State Switch, 5 - 2700 MHz, 50Ω; Manufacturer: Mini-Circuits; PartNumber: JSW3-272DR+; ComponentLink1Description: Product Page; ComponentLink1URL: https://www.minicircuits.com/WebStore/dashboard.html?model=JSW3-272DR%2B; ComponentLink2Description: DataSheet; ComponentLink2URL: https://www.minicircuits.com/WebStore/dashboardPdf?model=JSW3-272DR%2B
footprint MT1817 (Mini-Circuits case MT1817)
pins: 1 RF3, 2 GND, 3 RF1, 4 VDD, 5 CTRL3, 6 CTRL2, 7 CTRL1, 8 NC, 9 RF2, 10 GND, 11 GND, 12 NC, 13 RFC, 14 NC, 15 GND

## JSW4-272DR+
designator DA?
SP4T RF Switch 50Ω 5 to 2700 MHz High Power 3W; Manufacturer: Mini-Circuits; PartNumber: JSW4-272DR+; ComponentLink1Description: Product Page; ComponentLink1URL: https://www.minicircuits.com/WebStore/dashboard.html?model=JSW4-272DR%2B; ComponentLink2Description: DataSheet; ComponentLink2URL: https://www.minicircuits.com/WebStore/dashboardPdf?model=JSW4-272DR%2B
footprint MT1817 (Mini-Circuits case MT1817)
pins: 1 RF3, 2 GND, 3 RF1, 4 VDD, 5 CTRL3, 6 CTRL2, 7 CTRL1, 8 NC, 9 RF2, 10 GND, 11 RF4, 12 NC, 13 RFC, 14 NC, 15 GND

## JSW6-33DR+
designator DA?
SP6T RF Switch 50Ω 5 to 2700 MHz High Power 3W; Manufacturer: Mini-Circuits; PartNumber: JSW6-33DR+; ComponentLink1Description: Product Page; ComponentLink1URL: https://www.minicircuits.com/WebStore/dashboard.html?model=JSW6-33DR%2B; ComponentLink2Description: DataSheet; ComponentLink2URL: https://www.minicircuits.com/WebStore/dashboardPdf?model=JSW6-33DR%2B
footprint MT1817 (Mini-Circuits case MT1817)
pins: 1 RF5, 2 RF3, 3 RF1, 4 VDD, 5 CTRL3, 6 CTRL2, 7 CTRL1, 8 NC, 9 RF2, 10 RF4, 11 RF6, 12 NC, 13 RFC, 14 NC, 15 GND

## MAMF-011070
designator DA?
High Power Switch with Integrated Bias Control; Manufacturer: MACOM; PartNumber: MAMF-011070; ComponentLink1Description: Product Page; ComponentLink1URL: https://www.macom.com/products/product-detail/MAMF-011070; ComponentLink2Description: DataSheet; ComponentLink2URL: https://cdn.macom.com/datasheets/MAMF-011070.pdf
footprint QFN21P65_500X500X160L47X30T320N (Quad Flat No-Lead (QFN with Tab), 0.65 mm pitch; square, 5 pin X 5 pin, 5.00 mm L X 5.00 mm W X 1.60 mm H body)
pins: 1 GND, 2 N/C, 3 ANT, 4 GND, 5 GND, 6 RX, 7 GND, 8 RX Bias, 9 RXD Bias, 10 RXD, 11 GND, 12 COMP, 13 FB, 14 VREC, 15 VUREC, 16 VCC, 17 VCTRL, 18 TXD, 19 GND, 20 TX, 21 GND

## NHDS04
designator S?
SWITCH SLIDE DIP SPST 25MA 24V 4POS ON; Manufacturer: Omron; PartNumber: NHDS04
footprint DIP4_SOIC8P127_631X670X145L65X40 (DIP4 based on Small Outline IC (SOIC), 1.27 mm pitch; 8 pin, 6.31 mm L X 4.50 mm W X 1.45 mm H body)
pins: A1, A2, A3, A4, B1, B2, B3, B4

## NHDS06
designator S?
SWITCH SLIDE DIP SPST 25MA 24V 6POS ON; Manufacturer: Omron; PartNumber: NHDS06
footprint DIP6_SOIC12P127_885X670X145L65X40 (DIP6 based on Small Outline IC (SOIC), 1.27 mm pitch; 12 pin, 8.85 mm L X 4.50 mm W X 1.45 mm H body)
pins: A1, A2, A3, A4, A5, A6, B1, B2, B3, B4, B5, B6

## OMRON B3F-1000
designator S?, comment B3F-1000
Tactile Switch 6x6x4.3, Ivory; Manufacturer: Omron; PartNumber: B3F-1000; ComponentLink1Description: Product Page; ComponentLink1URL: https://components.omron.com/eu-en/products/switches/B3F; ComponentLink2Description: DataSheet; ComponentLink2URL: https://components.omron.com/eu-en/asset/54416; FunctionName: *
footprint OMRON B3F-1000 (Tactile Switch 6x6x4.3, Ivory)
pins: 1, 2 IN1, 3, 4 IN2

## OMRON G5NB
designator KV?, comment G5NB-1ADCxx
A Slim Compact Relay with 3 A Switching / Capability and 10-kV Impulse Withstand / Voltage, Form A (SPST-NO), No Polatity; Manufacturer: Omron; PartNumber: G5NB-1ADCxx
footprint OMRON G5NB (4 pin Relay 20.4x7.0x15.0)
part A pins: 1, 4
part B pins: 2, 3

## QPC6054
designator DA?, comment QPC6054SQ
High Isolation SP5T Switch 5 MHz to 6000 MHz; Manufacturer: Qorvo; PartNumber: QPC6054SQ; ComponentLink1Description: Product Page; ComponentLink1URL: https://www.qorvo.com/products/p/QPC6054; ComponentLink2Description: DataSheet; ComponentLink2URL: https://www.qorvo.com/products/d/da000273
footprint QFN25P50_400X400X95L40X25T270N (Quad Flat No-Lead (QFN with Tab), 0.50 mm pitch; square, 6 pin X 6 pin, 4.00 mm L X 4.00 mm W X 0.95 mm H body)
pins: 1 GND, 2 RF5, 3 GND, 4 GND, 5 RF4, 6 GND, 7 GND, 8 RF3, 9 GND, 10 GND, 11 RF2, 12 GND, 13 GND, 14 RF1, 15 GND, 16 Vdd, 17 V1, 18 V2, 19 V3, 20 Vss/GND, 21 GND, 22 RFC, 23 GND, 24 GND, 25 GND

## RF3021
designator DA?
High Isolation, Single Bit Control,Reflective Switch; Manufacturer: Qorvo; ComponentLink1Description: Product Page; ComponentLink1URL: https://www.qorvo.com/products/p/RF3021; PartNumber: RF3021; ComponentLink2Description: DataSheet; ComponentLink2URL: https://www.qorvo.com/products/d/da000416
footprint PQFN50P300X300X85_HS-17M (PQFN, 16-Leads, Body 3,00x3,00mm, Pitch 0,50mm, Thermal Pad 1,50x1,50mm, IPC Low Density)
pins: 1 GND, 2 GND, 3 RFC, 4 GND, 5 Vdd, 6 GND, 7 GND, 8 RF1, 9 GND, 10 GND, 11 GND, 12 GND, 13 RF2, 14 GND, 15 GND, 16 Vc, 17 GND

## SKY19237-001
designator DA?
0.7 to 2.7 GHz Triple SPST (3xSPST) Shunt MIPI® Antenna Tuning Switch; Manufacturer: Skyworks; PartNumber: SKY19237-001; ComponentLink1Description: Product Page; ComponentLink1URL: https://www.skyworksinc.com/en/Products/switches/SKY19237-001; ComponentLink2Description: DataSheet; ComponentLink2URL: https://www.skyworksinc.com/-/media/SkyWorks/Documents/Products/2201-2300/SKY19237-001_203679H.pdf
footprint SKY19237-001 (Skyworks BGA SKY19237-001 1.685x1.775x0.547)
pins: A1 RF1, A3 RF2, A5 RF3, B1 GND, B2 USID, B3 GND, B4 GND, C1 VDD, C2 VIO, C3 CLK, C4 DATA

## SKYA21024
designator DA?
0.01 TO 6.0 GHz SINGLE CONTROL SPDT SWITCH; Manufacturer: Skyworks; PartNumber: SKYA21024; ComponentLink1Description: Product Page; ComponentLink1URL: https://www.skyworksinc.com/en/Products/switches/SKYA21024; ComponentLink2Description: DataSheet; ComponentLink2URL: https://www.skyworksinc.com/-/media/SkyWorks/Documents/Products/2701-2800/SKYA21024_204618C.pdf
footprint SKYA21024 (Slyworks SKYA21024)
pins: 1 VDD, 2 RF1, 3 GND, 4 RF2, 5 VCTL, 6 RFC

## TE 1-5435802-5
designator S?
RIGHT ANGLE DIP SW 4 P SEALED; Manufacturer: TE Connectivity; PartNumber: TE 1-5435802-5; ComponentLink1Description: Product Page; ComponentLink1URL: https://www.te.com/usa-en/product-1-5435802-5.html
footprint TE 1-5435802-5 (RIGHT ANGLE DIP SW 4 P SEALED)
part A pins: A1, B1
part B pins: A2, B2
part C pins: A3, B3
part D pins: A4, B4

## TE 1825255-1
designator S?, comment 1825255-1
Slide Switches, Single Pole - Double Throw Configuration (Pole-Throw), Vertical, Copper Alloy, Single Actuator, 2 Position, On None On, Alcoswitch MHS; Manufacturer: TE Connectivity; PartNumber: 1825255-1; ComponentLink1Description: Product Page; ComponentLink1URL: https://www.te.com/usa-en/product-1825255-1.html; State_2-1: *; ComponentLink2Description: DataSheet; ComponentLink2URL: https://www.te.com/commerce/DocumentDelivery/DDEController?Action=showdoc&DocId=Customer+Drawing%7F1825255%7FB2%7Fpdf%7FEnglish%7FENG_CD_1825255_B2.pdf%7F1825255-1; State_2-3: *
footprint TE 1825255-1 (Slide Switches, Single Pole - Double Throw Configuration (Pole-Throw), Vertical, Copper Alloy, Single Actuator, 2 Position, On None On)
pins: 1, 2, 3


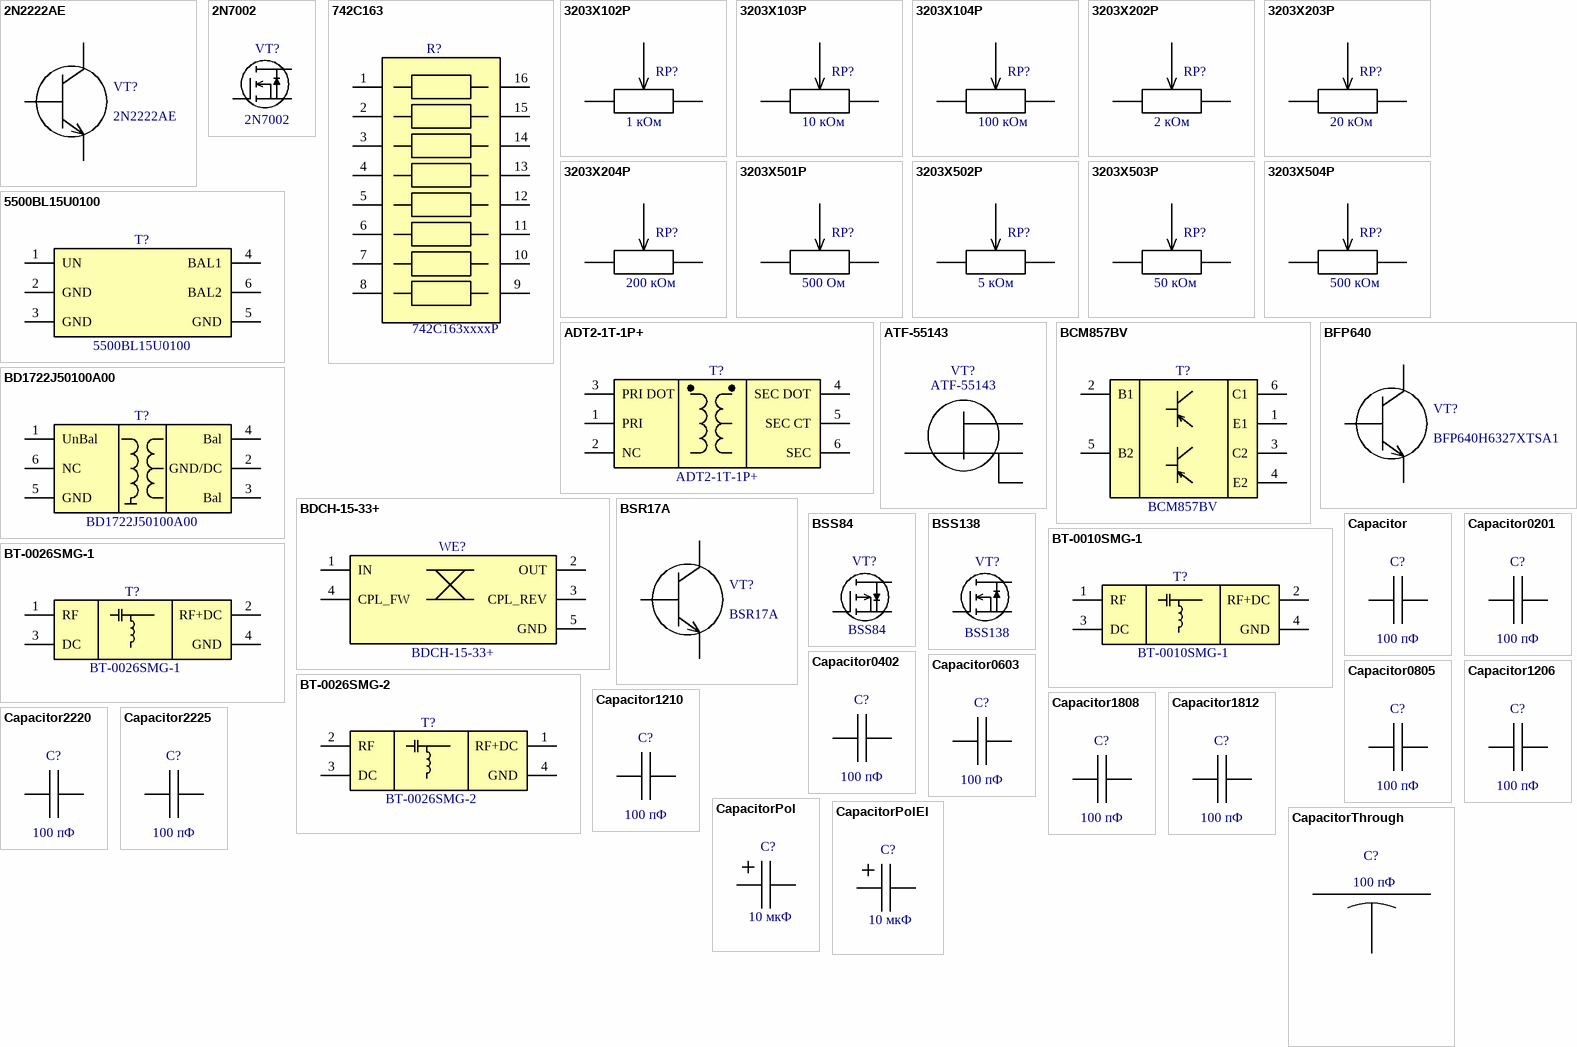
[diagram p11: symbols 2N2222AE to CapacitorThrough]

## 2N2222AE
designator VT?
NPN Transistor, General Purpose Transistor; PartNumber: 2N2222AE; Manufacturer: *
footprint TRXSOFL3P50_160X160X80L40X26 (Transistor, Small Outline Flat Lead (SOFL), 0.50 mm pitch; 3 pin, 1.60 mm L X 0.825 mm W X 0.80 mm H body)
pins: 1 B "base", 2 E "emitter", 3 C "collector"

## 2N7002
designator VT?
N-CHANNEL ENHANCEMENT MODE MOSFET; Manufacturer: Diodes Inc; PartNumber: 2N7002; ComponentLink1Description: Product Page; ComponentLink1URL: https://www.diodes.com/part/view/2N7002; ComponentLink2Description: DataSheet; ComponentLink2URL: https://www.diodes.com/assets/Datasheets/2N7002.pdf
footprint SOT23-3P91_240X115L40X40N (Small Outline Transistor (SOT23), 0.915 mm pitch; 3 pin, 2.90 mm L X 1.30 mm W X 1.15 mm H body)
pins: 1 G, 2 S, 3 D

## 742C163
designator R?, comment 742C163xxxxP
Chip Resistor Array 0603 X 8 Isolated; Manufacturer: CTS Components; PartNumber: 742C163xxxxP; Value: *; Tolerance: *; Power: *; DCV: *; ComponentLink1Description: Product Page; ComponentLink1URL: https://www.ctscorp.com/connect_product_line/resistor-networks-rc-terminations/; ComponentLink2Description: DataSheet; ComponentLink2URL: https://www.ctscorp.com/wp-content/uploads/74x.pdf
footprint RESCAV16P80_640X160X70L30X50N (Chip Array, 2 Side Concave, 0.80 mm pitch; 16 pin, 6.40 mm L X 1.60 mm W X 0.70 mm H body)
pins: 1, 2, 3, 4, 5, 6, 7, 8, 9, 10, 11, 12, 13, 14, 15, 16

## 3203X102P
designator RP?, comment 1 кОм
1K Ω, Cermet, Continuous Trimmer Potentiometer, .25 %, Surface Mount, 3.4 x 3.4 x 2 mm, .05 W, 1 Turns, Top, Horizontal, ±100 ppm/°C, Citec 3203; PartNumber: 3203X102P; Manufacturer: TE Connectivity; Tolerance: ±0,25%; Power: 1/20 Вт; Value: 1 кОм; ComponentLink1Description: Product Page; ComponentLink1URL: https://www.te.com/usa-en/product-1623916-2.html
footprint TE 3203X (TE Connectivity 3203X)
pins: 1, 2, 3

## 3203X103P
designator RP?, comment 10 кОм
10K Ω, Cermet, Continuous Trimmer Potentiometer, .25 %, Surface Mount, 3.4 x 3.4 x 2 mm, .05 W, 1 Turns, Top, Horizontal, ±100 ppm/°C, Citec 3203; PartNumber: 3203X103P; Manufacturer: TE Connectivity; Tolerance: ±0,25%; Power: 1/20 Вт; Value: 10 кОм; ComponentLink1Description: Product Page; ComponentLink1URL: https://www.te.com/usa-en/product-1623916-3.html
footprint TE 3203X (TE Connectivity 3203X)
pins: 1, 2, 3

## 3203X104P
designator RP?, comment 100 кОм
100K Ω, Cermet, Continuous Trimmer Potentiometer, .25 %, Surface Mount, 3.4 x 3.4 x 2 mm, .05 W, 1 Turns, Top, Horizontal, ±100 ppm/°C, Citec 3203; PartNumber: 3203X104P; Manufacturer: TE Connectivity; Tolerance: ±0,25%; Power: 1/20 Вт; Value: 100 кОм; ComponentLink1Description: Product Page; ComponentLink1URL: https://www.te.com/usa-en/product-1623916-4.html
footprint TE 3203X (TE Connectivity 3203X)
pins: 1, 2, 3

## 3203X202P
designator RP?, comment 2 кОм
2K Ω, Cermet, Continuous Trimmer Potentiometer, .25 %, Surface Mount, 3.4 x 3.4 x 2 mm, .05 W, 1 Turns, Top, Horizontal, ±100 ppm/°C, Citec 3203; PartNumber: 3203X202P; Manufacturer: TE Connectivity; Tolerance: ±0,25%; Power: 1/20 Вт; Value: 2 кОм; ComponentLink1Description: Product Page; ComponentLink1URL: https://www.te.com/usa-en/product-1623916-6.html
footprint TE 3203X (TE Connectivity 3203X)
pins: 1, 2, 3

## 3203X203P
designator RP?, comment 20 кОм
20K Ω, Cermet, Continuous Trimmer Potentiometer, .25 %, Surface Mount, 3.4 x 3.4 x 2 mm, .05 W, 1 Turns, Top, Horizontal, ±100 ppm/°C, Citec 3203; PartNumber: 3203X203P; Manufacturer: TE Connectivity; Tolerance: ±0,25%; Power: 1/20 Вт; Value: 20 кОм; ComponentLink1Description: Product Page; ComponentLink1URL: https://www.te.com/usa-en/product-1623916-7.html
footprint TE 3203X (TE Connectivity 3203X)
pins: 1, 2, 3

## 3203X204P
designator RP?, comment 200 кОм
200K Ω, Cermet, Continuous Trimmer Potentiometer, .25 %, Surface Mount, 3.4 x 3.4 x 2 mm, .05 W, 1 Turns, Top, Horizontal, ±100 ppm/°C, Citec 3203; PartNumber: 3203X204P; Manufacturer: TE Connectivity; Tolerance: ±0,25%; Power: 1/20 Вт; Value: 200 кОм; ComponentLink1Description: Product Page; ComponentLink1URL: https://www.te.com/usa-en/product-1623916-8.html
footprint TE 3203X (TE Connectivity 3203X)
pins: 1, 2, 3

## 3203X501P
designator RP?, comment 500 Ом
500 Ω, Cermet, Continuous Trimmer Potentiometer, .25 %, Surface Mount, 3.4 x 3.4 x 2 mm, .05 W, 1 Turns, Top, Horizontal, ±100 ppm/°C, Citec 3203; PartNumber: 3203X501P; Manufacturer: TE Connectivity; Tolerance: ±0,25%; Power: 1/20 Вт; Value: 500 Ом; ComponentLink1Description: Product Page; ComponentLink1URL: https://www.te.com/usa-en/product-1623916-9.html
footprint TE 3203X (TE Connectivity 3203X)
pins: 1, 2, 3

## 3203X502P
designator RP?, comment 5 кОм
5K Ω, Cermet, Single Turn Trimmer Potentiometer, .25 %, Surface Mount, 3.4 x 3.4 x 2 mm, .05 W, 1 Turns, Top, Horizontal, ±100 ppm/°C, Citec 3203; PartNumber: 3203X502P; Manufacturer: TE Connectivity; Tolerance: ±0,25%; Power: 1/20 Вт; Value: 5 кОм; ComponentLink1Description: Product Page; ComponentLink1URL: https://www.te.com/usa-en/product-1-1623916-0.html
footprint TE 3203X (TE Connectivity 3203X)
pins: 1, 2, 3

## 3203X503P
designator RP?, comment 50 кОм
50K Ω, Cermet, Continuous Trimmer Potentiometer, .25 %, Surface Mount, 3.4 x 3.4 x 2 mm, .05 W, 1 Turns, Top, Horizontal, ±100 ppm/°C, Citec 3203; PartNumber: 3203X503P; Manufacturer: TE Connectivity; Tolerance: ±0,25%; Power: 1/20 Вт; Value: 50 кОм; ComponentLink1Description: Product Page; ComponentLink1URL: https://www.te.com/usa-en/product-1-1623916-1.html
footprint TE 3203X (TE Connectivity 3203X)
pins: 1, 2, 3

## 3203X504P
designator RP?, comment 500 кОм
500K Ω, Cermet, Continuous Trimmer Potentiometer, .25 %, Surface Mount, 3.4 x 3.4 x 2 mm, .05 W, 1 Turns, Top, Horizontal, ±100 ppm/°C, Citec 3203; PartNumber: 3203X504P; Manufacturer: TE Connectivity; Tolerance: ±0,25%; Power: 1/20 Вт; Value: 500 кОм; ComponentLink1Description: Product Page; ComponentLink1URL: https://www.te.com/usa-en/product-1-1623916-2.html
footprint TE 3203X (TE Connectivity 3203X)
pins: 1, 2, 3

## 5500BL15U0100
designator T?
UWB Balun (3 - 8 GHz); Manufacturer: Johanson; PartNumber: 5500BL15U0100; ComponentLink1Description: Product Page; ComponentLink1URL: https://www.johansontechnology.com/baluns?option=com_products&id=5500BL15U0100; ComponentLink2Description: DataSheet; ComponentLink2URL: https://www.johansontechnology.com/datasheets/5500BL15U0100/5500BL15U0100.pdf
footprint ICCAF6P65_200X125X105L27X30N (Chip Array, 2 Side Flat, 0.65 mm pitch; 6 pin, 2.00 mm L X 1.25 mm W X 1.05 mm H body)
pins: 1 UN, 2 GND, 3 GND, 4 BAL1, 5 GND, 6 BAL2

## ADT2-1T-1P+
designator T?
1:2 CORE & WIRE Transformer, 8 - 600 MHz, 50Ω; Manufacturer: Mini-Circuits; PartNumber: ADT2-1T-1P+; ComponentLink1Description: Product Page; ComponentLink1URL: https://www.minicircuits.com/WebStore/dashboard.html?model=ADT2-1T-1P%2B; ComponentLink2Description: DataSheet; ComponentLink2URL: https://www.minicircuits.com/WebStore/dashboardPdf?model=ADT2-1T-1P%2B
footprint CD542 (Mini-Circuirts case CD542)
pins: 1 PRI, 2 NC, 3 PRI DOT, 4 SEC DOT, 5 SEC CT, 6 SEC

## ATF-55143
designator VT?
Low Noise PHEMT w/t dbl source; Manufacturer: Broadcom; PartNumber: ATF-55143
footprint SOT343-4RP130_210X120L28X27N (Small Outline Transistor (SOT143), 1.30 mm pitch; 4 pin, 2.05 mm L X 1.25 mm W X 1.20 mm H body (w/reversed pins))
pins: 1 S1, 2 D, 3 S2, 4 G

## BCM857BV
designator T?
PNP/PNP matched double transistor; Manufacturer: Nexperia; PartNumber: BCM857BV; ComponentLink1Description: ProductPage; ComponentLink1URL: https://www.nexperia.com/products/bipolar-transistors/special-feature-transistors/matched-pair-transistors/BCM857BV.html; ComponentLink2Description: DataSheet; ComponentLink2URL: https://assets.nexperia.com/documents/data-sheet/BCM857BV_BS_DS.pdf
footprint SOTFL50P160X60-6N (SOTFL, 6-Leads, Body 1.60x1.60mm, Pitch 0.50mm, IPC Medium Density)
pins: 1 E1, 2 B1, 3 C2, 4 E2, 5 B2, 6 C1

## BD1722J50100A00
designator T?
Ultra Low Profile 0805 Balun 50 to 100 Balanced; Manufacturer: Anaren Microwave; PartNumber: BD1722J50100A00; ComponentLink1Description: Product Page; ComponentLink1URL: https://www.ttm.com/en/solutions/rfs-components/xinger-components/balun-transformers; ComponentLink2Description: DataSheet; ComponentLink2URL: https://cdn.ttm.com/repository/products/wireless-xinger/balun-transformers/BD1722J50100AHF/BD1722J50100AHF_97_E.pdf
footprint PSON6P65_200X125X75L22X30N (Pullback Small Outline No-Lead (PSON), 0.65 mm pitch; 6 pin, 2.00 mm L X 1.25 mm W X 0.75 mm H body)
pins: 1 UnBal, 2 GND/DC, 3 Bal, 4 Bal, 5 GND, 6 NC

## BDCH-15-33+
designator WE?
15.5 dB SMT Bi-Directional Coupler, 500 - 3000 MHz, 50Ω; Manufacturer: Mini-Circuits; PartNumber: BDCH-15-33+; ComponentLink1Description: Product Page; ComponentLink1URL: https://www.minicircuits.com/WebStore/dashboard.html?model=BDCH-15-33%2B; ComponentLink2Description: DataSheet; ComponentLink2URL: https://www.minicircuits.com/WebStore/dashboardPdf?model=BDCH-15-33%2B
footprint PQ2098 (Mini-Circuits CASE PQ2098)
pins: 1 IN, 2 OUT, 3 CPL_REV, 4 CPL_FW, 5 GND

## BFP640
designator VT?, comment BFP640H6327XTSA1
Surface mount high linearity silicon NPN RF bipolar transistor; Manufacturer: Infineon; PartNumber: BFP640H6327XTSA1; ComponentLink1Description: Product Page; ComponentLink1URL: https://www.infineon.com/cms/en/product/rf/rf-transistor/low-noise-rf-transistors/bfp640/#; ComponentLink2Description: DataSheet; ComponentLink2URL: https://www.infineon.com/dgdl/Infineon-BFP640-DS-v03_00-EN.pdf?fileId=5546d462689a790c01690f03a9ca3928
footprint Infineon SOT343 (Small Outline Transistor (SOT143), 1.30 mm pitch; 4 pin, 2.00 mm L X 1.25 mm W X 1.00 mm H body); pin to pad 2>2+4
pins: 1 B "base", 2 E "emitter", 3 C "collector"

## BSR17A
designator VT?
NPN Transistor, General Purpose Transistor; Manufacturer: OnSemi; PartNumber: BSR17A; ComponentLink1Description: Product Page; ComponentLink1URL: https://www.onsemi.com/products/discrete-power-modules/general-purpose-and-low-vcesat-transistors/bsr17a; ComponentLink2Description: DataSheet; ComponentLink2URL: https://www.onsemi.com/download/data-sheet/pdf/bsr17a-d.pdf
footprint SOT23-3P95_240X120L30X48N (Small Outline Transistor (SOT23), 0.95 mm pitch; 3 pin, 2.92 mm L X 1.325 mm W X 1.20 mm H body)
pins: 1 B "base", 2 E "emitter", 3 C "collector"

## BSS84
designator VT?
P-CHANNEL ENHANCEMENT MODE MOSFET; Manufacturer: Diodes Inc; PartNumber: BSS84; ComponentLink1Description: Product Page; ComponentLink1URL: https://www.diodes.com/part/view/BSS84; ComponentLink2Description: DataSheet; ComponentLink2URL: https://www.diodes.com/assets/Datasheets/BSS84.pdf
footprint SOT23-3P91_240X115L40X40N (Small Outline Transistor (SOT23), 0.915 mm pitch; 3 pin, 2.90 mm L X 1.30 mm W X 1.15 mm H body)
pins: 1 G, 2 S, 3 D

## BSS138
designator VT?
N-Channel Logic Level Enhancement Mode Field Effect Transistor; Manufacturer: OnSemi; PartNumber: BSS138; ComponentLink1Description: Product Page; ComponentLink1URL: https://www.onsemi.com/products/discrete-power-modules/mosfets/BSS138; ComponentLink2Description: DataSheet; ComponentLink2URL: https://www.onsemi.com/download/data-sheet/pdf/bss138-d.pdf
footprint SOT23-3P95_240X111L42X43N (Small Outline Transistor (SOT23), 0.95 mm pitch; 3 pin, 2.90 mm L X 1.30 mm W X 1.11 mm H body)
pins: 1 G, 2 S, 3 D

## BT-0010SMG-1
designator T?
20 MHz - 10 GHz Bias Tee, Surface Mount, Port Configiration 1; Manufacturer: Marki; PartNumber: BT-0010SMG-1; ComponentLink1Description: DataSheet; ComponentLink1URL: https://www.markimicrowave.com/Assets/datasheets/BT-0010SMG.pdf?v=032921
footprint BT-0010SMG (Marki Microwave case BT-0010SMG-1)
pins: 1 RF, 2 RF+DC, 3 DC, 4 GND

## BT-0026SMG-1
designator T?
20 MHz - 26 GHz Bias Tee, Surface Mount, Port Configiration 1; Manufacturer: Marki; PartNumber: BT-0026SMG-1; ComponentLink1Description: Product Page; ComponentLink1URL: https://markimicrowave.com/products/surface-mount/bias-tees-dc-blocks/bt-0026smg-1/datasheet/; ComponentLink2Description: DataSheet; ComponentLink2URL: https://markimicrowave.com/assets/9dd9949d-5389-4c94-b8b9-a7fec51fc8cb/BT-0026SMG-1-Miniature%20Surface%20Mount%20Bias%20Tee.pdf
footprint BT-0026SMG-1 (Marki Microwave case BT-0010SMG-1)
pins: 1 RF, 2 RF+DC, 3 DC, 4 GND

## BT-0026SMG-2
designator T?
20 MHz - 26 GHz Bias Tee, Surface Mount, Port Configiration 2; Manufacturer: Marki; PartNumber: BT-0026SMG-2; ComponentLink1Description: Product Page; ComponentLink1URL: https://markimicrowave.com/products/surface-mount/bias-tees-dc-blocks/bt-0026smg-2/datasheet/; ComponentLink2Description: DataSheet; ComponentLink2URL: https://markimicrowave.com/assets/6264d400-366a-4899-8997-82a3fa326f06/BT-0026SMG-2-Miniature%20Surface%20Mount%20Bias%20Tee.pdf
footprint BT-0026SMG-2 (Marki Microwave case BT-0010SMG-2)
pins: 1 RF+DC, 2 RF, 3 DC, 4 GND

## Capacitor
designator C?, comment 100 пФ
Capacitor, generic; Value: 100 пФ; PartNumber: *; Tolerance: *; VDC: *; Dielectric: *; Manufacturer: *; Package: 0402
footprint CAPC60X30X33L15N (Capacitor, Chip; 0.60 mm L X 0.30 mm W X 0.33 mm H body)
footprint CAPC100X50X55L20N (Capacitor, Chip; 1.00 mm L X 0.50 mm W X 0.55 mm H body)
footprint CAPC146X140X145L31N (Capacitor, Chip; 1.465 mm L X 1.40 mm W X 1.45 mm H body)
footprint CAPC160X80X90L30N (Capacitor, Chip; 1.60 mm L X 0.80 mm W X 0.90 mm H body)
footprint CAPC200X125X95L50N (Capacitor, Chip; 2.00 mm L X 1.25 mm W X 0.95 mm H body)
footprint CAPC320X160X180L20N (Capacitor, Chip; 3.20 mm L X 1.60 mm W X 1.80 mm H body)
footprint CAPC320X250X280L20N (Capacitor, Chip; 3.20 mm L X 2.50 mm W X 2.80 mm H body)
footprint CAPC450X320X360L20N (Capacitor, Chip; 4.50 mm L X 3.20 mm W X 3.60 mm H body)
footprint CAPC470X200X115L60N (Capacitor, Chip; 4.70 mm L X 2.00 mm W X 1.15 mm H body)
footprint CAPC560X640X155L60N (Capacitor, Chip; 5.60 mm L X 6.40 mm W X 1.55 mm H body)
footprint CAPC570X500X310L20N (Capacitor, Chip; 5.70 mm L X 5.00 mm W X 3.10 mm H body)
pins: 1, 2

## Capacitor0201
designator C?, comment 100 пФ
Capacitor, chip, 0201; Value: 100 пФ; PartNumber: *; Tolerance: *; VDC: *; Dielectric: *; Manufacturer: *; Package: 0201
footprint CAPC60X30X33L15N (Capacitor, Chip; 0.60 mm L X 0.30 mm W X 0.33 mm H body)
pins: 1, 2

## Capacitor0402
designator C?, comment 100 пФ
Capacitor, chip, 0402; Value: 100 пФ; PartNumber: *; Tolerance: *; VDC: *; Dielectric: *; Manufacturer: *; Package: 0402
footprint CAPC100X50X55L20N (Capacitor, Chip; 1.00 mm L X 0.50 mm W X 0.55 mm H body)
pins: 1, 2